# Altium footprint library Capacitors.PcbLib: 20 footprints (part 2 of 2)
Each footprint in its own frame and in the unit in brackets; x right, y up, seen from the top. Pads: shape width x height; smd on the part's side, far side on the other; paste and mask are expansions set on the pad; w line width, h text height; cw(c..) or ccw(c..) is an arc to the next point about the centre after c.
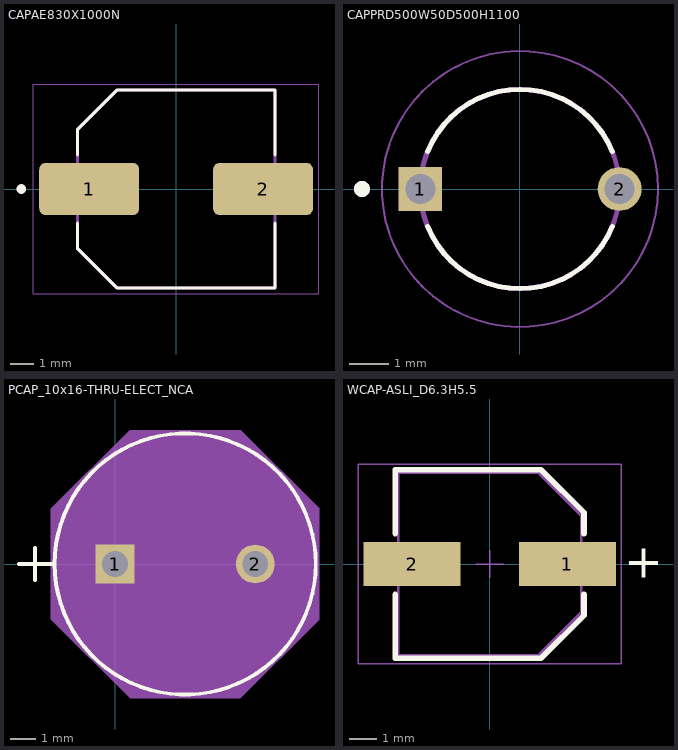
[diagram p1: the footprints below, top view; thin cyan lines are the x and y axes]

## CAPAE830X1000N [mm]
height 7.7
pads (2):
  rrect25% 4.2x2.2 smd: 1(-3.65,0) 2(3.65,0)
Top Overlay:
  circle w0.2: c-6.5,0 r0.1
  lines w0.127: -4.15,-1.42 -4.15,-2.49 -2.49,-4.15 4.15,-4.15 4.15,-1.42 ; -4.15,1.42 -4.15,2.49 -2.49,4.15 4.15,4.15 4.15,1.42
Mechanical 13:
  circle w0.2: c-6.5,0 r0.1
  lines w0.127: -4.15,-2.49 -2.49,-4.15 4.15,-4.15 4.15,4.15 -2.49,4.15 -4.15,2.49 -4.15,-2.49
Mechanical 15:
  lines w0.05: -6,-4.4 6,-4.4 6,4.4 -6,4.4 -6,-4.4
3D body "step_temp.STEP": height 7.55, standoff -0.45, extent -3.5,-3.3 3.5,3.3

## CAPPRD500W50D500H1100 [mm]
pads (2):
  rect 1.1x1.1 / inner round 1.1 / far side rect 1.1x1.1 hole 0.75: 1(-2.5,0)
  round 1.1 hole 0.75: 2(2.5,0)
Top Overlay:
  circle w0.2: c-3.963,0 r0.1
  lines w0.127: -2.318,-0.937 ccw(c0,0) 2.318,-0.937 ; -2.318,0.937 cw(c0,0) 2.318,0.937
Mechanical 13:
  circle w0.2: c-3.963,0 r0.1
  circle w0.127: c0,0 r2.5
Mechanical 15:
  circle w0.05: c0,0 r3.463
3D body "step_temp.STEP": height 12.5, standoff -15.5, extent -2.75,-2.498 2.75,2.498

## PCAP_10x16-THRU-ELECT_NCA [mil]
pads (2):
  rect 60x60 / inner round 60 / far side rect 60x60 hole 40 paste-99999 mask+0: 1(0,0)
  round 60 hole 40 paste-99999 mask+0: 2(217,0)
Top Overlay:
  circle w6: c108.5,0 r202
  lines w6: -148.5,0 -98.5,0 ; -123.5,-25 -123.5,25
Mechanical 13:
  circle w0: c108.5,0 r197
  lines w1: -148.5,0 -98.5,0 ; -123.5,-25 -123.5,25
Mechanical 15:
  region: -98.5,85.24 23.26,207 193.74,207 315.5,85.24 315.5,-85.24 193.74,-207 23.26,-207 -98.5,-85.24
  lines w1: -98.5,-85.24 -98.5,85.24 23.26,207 193.74,207 315.5,85.24 315.5,-85.24 193.74,-207 23.26,-207 -98.5,-85.24
3D body "PCAP_10x16-THRU-ELECT_NCA.step": height 628.62, standoff -190, extent -88.5,-196.88 306.48,196.88

## WCAP-ASLI_D6.3H5.5 [mm] "Aluminium Electrolytic V-Chip SMT Capacitors, 6.3x5.5mm"
height 5.5
pads (2):
  rect 3.5x1.6 smd: 1(2.8,0) 2(-2.8,0)
Top Overlay:
  lines w0.2: -3.4,-1.1 -3.4,-3.4 1.85,-3.4 3.4,-1.85 3.4,-1.1 ; -3.4,1.1 -3.4,3.4 1.85,3.4 3.4,1.85 3.4,1.1
  text "+" at 4.85,-0.5 h1.22
Top Courtyard:
  lines w0.05: -0.5,0 0.5,0 ; 0,-0.5 0,0.5 ; -4.75,-3.6 4.75,-3.6 4.75,3.6 -4.75,3.6 -4.75,-3.6
Top Designator:
  text ".Designator" at -7.498,-0.5 h1.5
Top 3D Body:
  lines w0.1: -3.3,-3.3 -3.3,3.3 1.75,3.3 3.3,1.75 3.3,-1.75 1.75,-3.3 -3.3,-3.3
Top Component Outline:
  lines w0.1: -3.3,-3.3 -3.3,3.3 1.75,3.3 3.3,1.75 3.3,-1.75 1.75,-3.3 -3.3,-3.3
3D body "6.3x5.5x2.2.stp": height 5.5, standoff 0, extent -3.65,-3.3 3.65,3.3